# Altium footprint library PHOENIX_1727036.PcbLib: 1 footprints
Each footprint in its own frame and in the unit in brackets; x right, y up, seen from the top. Pads: shape width x height; smd on the part's side, far side on the other; paste and mask are expansions set on the pad; w line width, h text height; cw(c..) or ccw(c..) is an arc to the next point about the centre after c.
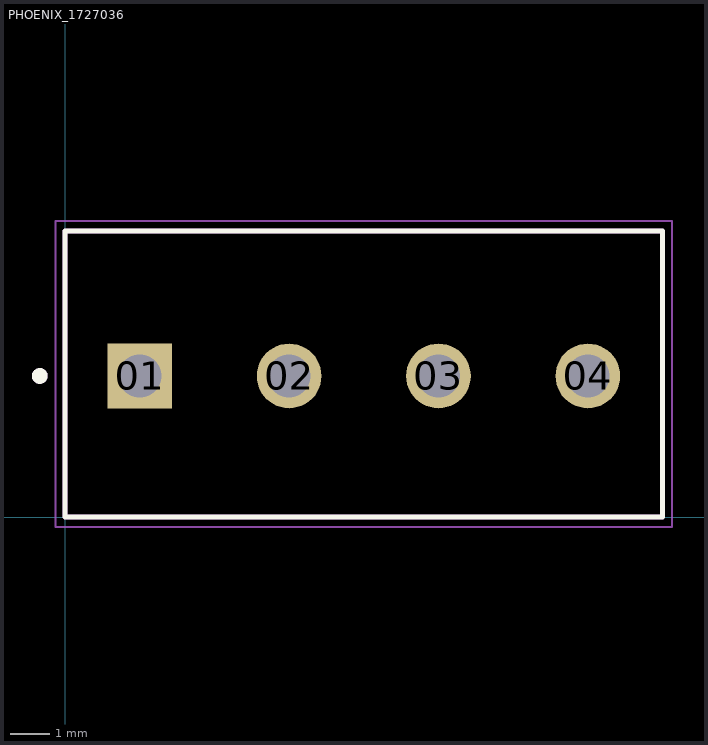
[diagram p0: the footprint, top view; thin cyan lines are the x and y axes]

## PHOENIX_1727036 [mm]
pads (4):
  rect 1.65x1.65 / inner round 1.65 / far side rect 1.65x1.65 hole 1.1: 01(1.9,3.6)
  round 1.65 hole 1.1: 02(5.71,3.6) 03(9.52,3.6) 04(13.33,3.6)
Top Overlay:
  circle w0.2: c-0.65,3.6 r0.1
  lines w0.127: 0,0 15.23,0 15.23,7.3 0,7.3 0,0
Mechanical 13:
  circle w0.2: c-0.65,3.6 r0.1
  lines w0.127: 0,0 15.23,0 15.23,7.3 0,7.3 0,0
Mechanical 15:
  lines w0.05: -0.25,-0.25 15.48,-0.25 15.48,7.55 -0.25,7.55 -0.25,-0.25
3D body "1727036.stp": height 8.5, standoff -3.5, extent 0,0 15.23,7.3